# Altium footprint library SamacSys.PcbLib: 1008 footprints (part 42 of 63)
Each footprint in its own frame and in the unit in brackets; x right, y up, seen from the top. Pads: shape width x height; smd on the part's side, far side on the other; paste and mask are expansions set on the pad; w line width, h text height; cw(c..) or ccw(c..) is an arc to the next point about the centre after c.
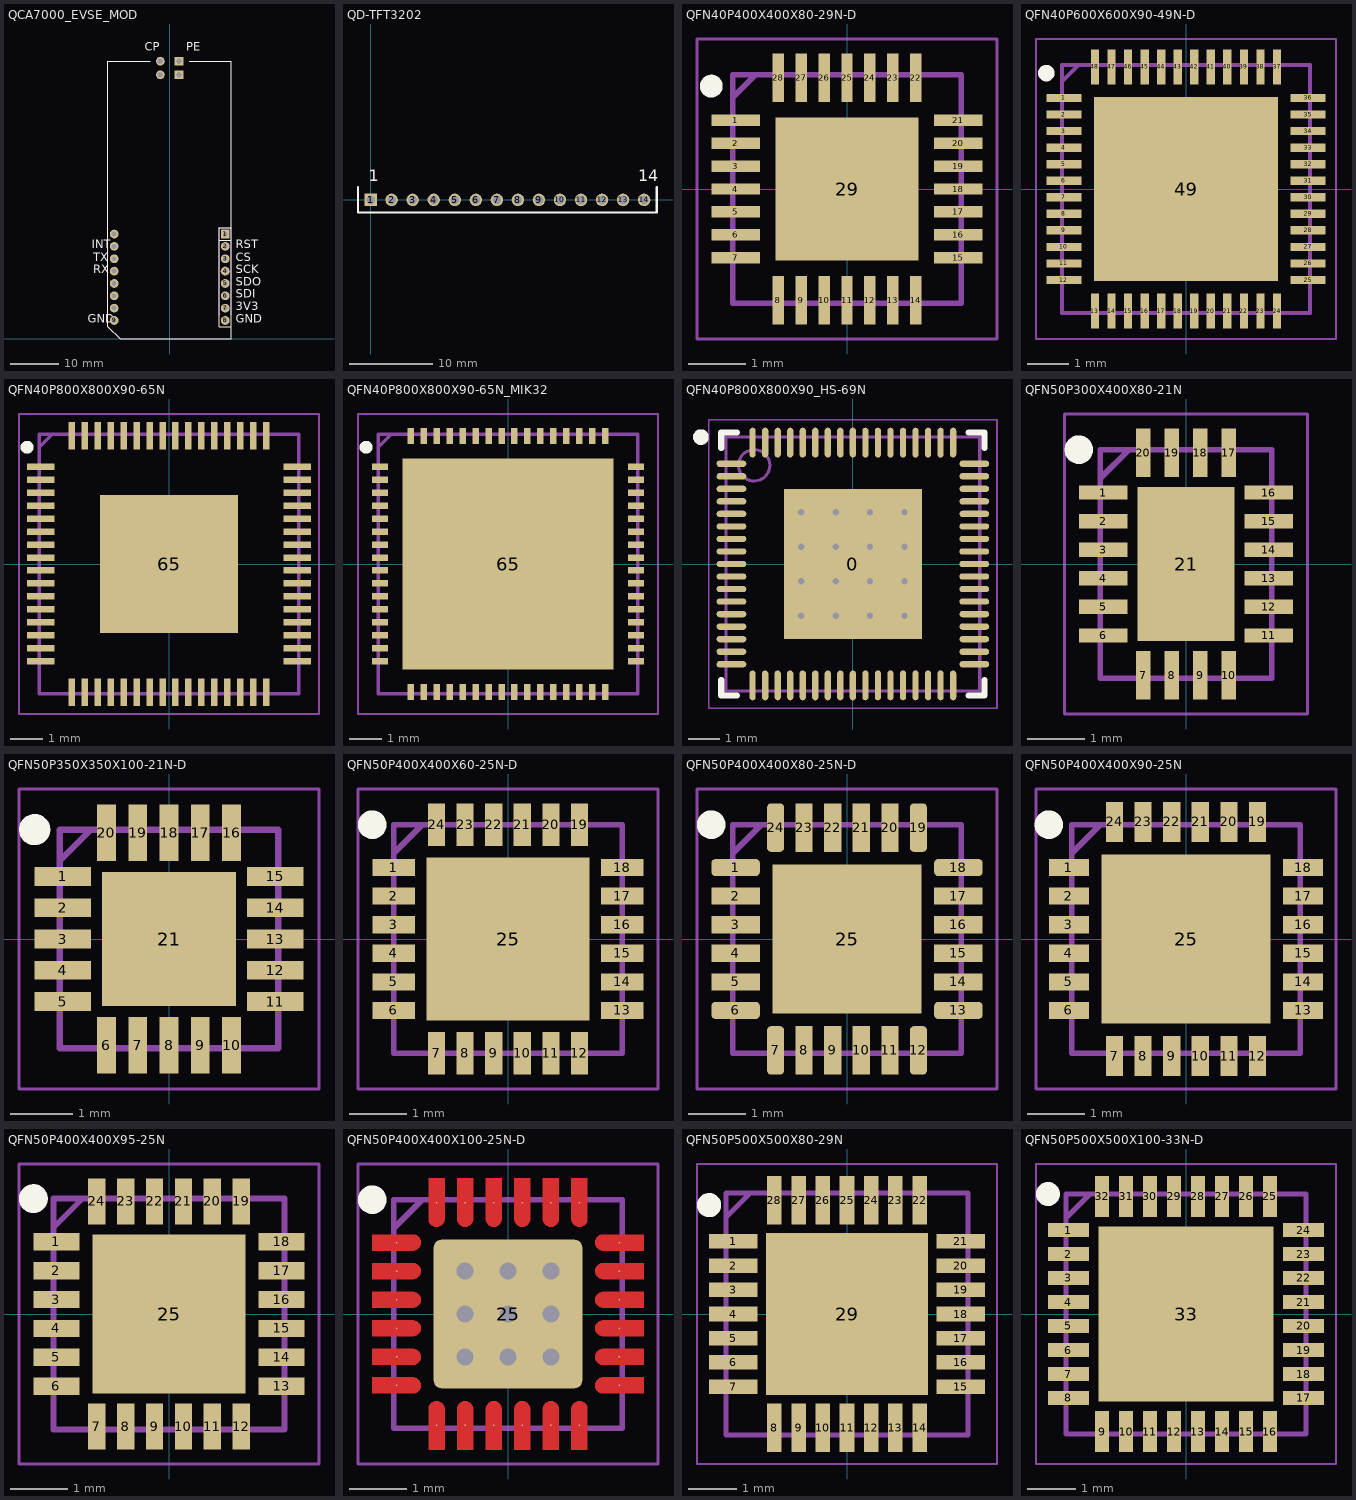
[diagram p41: the footprints below, top view; thin cyan lines are the x and y axes]

## QCA7000_EVSE_MOD [mm] "PBS-7 + 2xPBS-2"
height 10
pads (20):
  rect 1.8x1.8 hole 1: 1(11.43,21.59)
  round 1.8 hole 1: 2(11.43,19.05) 3(11.43,16.51) 4(11.43,13.97) 5(11.43,11.43) 6(11.43,8.89) 7(11.43,6.35) 8(11.43,3.81) 9(-11.43,3.81) 10(-11.43,6.35) 11(-11.43,8.89) 12(-11.43,11.43) 13(-11.43,13.97) 14(-11.43,16.51) 15(-11.43,19.05) 16(-11.43,21.59)
  rect 1.8x1.8 hole 1.1: 17(1.91,54.35) 17(1.91,57.15)
  round 1.8 hole 1.1: 18(-1.91,54.35) 18(-1.91,57.15)
Top Overlay:
  lines w0.2: -4,57.15 -12.7,57.15 -12.7,2.54 -10.16,0 12.7,0 12.7,57.15 4,57.15
  lines w0.25: 10.16,20.331 12.7,20.331 ; 10.16,2.54 10.16,22.871 12.7,22.871 12.7,2.54 10.16,2.54
  text "SDI" at 13.6,7.915 h3
  text "RST" at 13.6,18.075 h3
  text "3V3" at 13.6,5.248 h3
  text "SDO" at 13.6,10.328 h3
  text "SCK" at 13.6,12.868 h3
  text "CS" at 13.6,15.408 h3
  text "INT" at -16.043,18.075 h3
  text "GND" at 13.6,2.708 h3
  text "GND" at -16.884,2.708 h3
  text "TX" at -15.763,15.407 h3
  text "RX" at -15.763,12.867 h3
  text "PE" at 3.44,58.715 h3
  text "CP" at -5.08,58.704 h3
Assembly:
  lines w0.1: 10.16,5.091 10.16,22.871 12.7,22.871 12.7,5.091 ; 10.16,20.331 12.7,20.331
Countryard:
  lines w0.1: 10.16,5.091 10.16,22.871 12.7,22.871 12.7,5.091 ; 10.43,13.981 12.446,13.981 ; 11.43,12.965 11.43,14.997
3D body "User Library-PBS_(DS1023)_1line_connectors_h=5_0_8_5mm_step_2_54mm (4).step": height 8.5, standoff -3, extent 0.675,52.963 3.175,58.543
3D body "User Library-PBS_(DS1023)_1line_connectors_h=5_0_8_5mm_step_2_54mm (4).step": height 8.5, standoff -3, extent -3.135,52.963 -0.635,58.543
3D body "User Library-PBS_(DS1023)_1line_connectors_h=5_0_8_5mm_step_2_54mm (6).step": height 8.5, standoff -3, extent 10.18,2.29 12.68,23.11
3D body "User Library-PBS_(DS1023)_1line_connectors_h=5_0_8_5mm_step_2_54mm (6).step": height 8.5, standoff -3, extent -12.68,2.29 -10.18,23.11

## QD-TFT3202 [mm]
pads (14):
  rect 1.5x1.5 hole 1.05: 1(0,0)
  round 1.5 hole 1.05: 2(2.54,0) 3(5.08,0) 4(7.62,0) 5(10.16,0) 6(12.7,0) 7(15.24,0) 8(17.78,0) 9(20.32,0) 10(22.86,0) 11(25.4,0) 12(27.94,0) 13(30.48,0) 14(33.02,0)
Top Overlay:
  lines w0.254: -1.524,1.524 -1.524,-1.524 34.544,-1.524 34.544,1.524
  text "14" at 32.295,1.759 h2.4
  text "1" at -0.223,1.759 h2.4

## QFN40P400X400X80-29N-D [mm]
pads (29):
  rect 0.85x0.2 smd: 1(-1.95,1.2) 2(-1.95,0.8) 3(-1.95,0.4) 4(-1.95,0) 5(-1.95,-0.4) 6(-1.95,-0.8) 7(-1.95,-1.2) 15(1.95,-1.2) 16(1.95,-0.8) 17(1.95,-0.4) 18(1.95,0) 19(1.95,0.4) 20(1.95,0.8) 21(1.95,1.2)
  rect 0.2x0.85 smd: 8(-1.2,-1.95) 9(-0.8,-1.95) 10(-0.4,-1.95) 11(0,-1.95) 12(0.4,-1.95) 13(0.8,-1.95) 14(1.2,-1.95) 22(1.2,1.95) 23(0.8,1.95) 24(0.4,1.95) 25(0,1.95) 26(-0.4,1.95) 27(-0.8,1.95) 28(-1.2,1.95)
  rect 2.5x2.5 smd: 29(0,0)
Top Overlay:
  circle w0.2: c-2.375,1.8 r0.1
Assembly:
  lines w0.1: -2,1.6 -1.6,2 ; -2,-2 -2,2 2,2 2,-2 -2,-2
Countryard:
  lines w0.05: -2.625,-2.625 -2.625,2.625 2.625,2.625 2.625,-2.625 -2.625,-2.625
3D body "SW3516H.stp": height 0.8, standoff 0, extent -2.05,-2.05 2.05,2.05

## QFN40P600X600X90-49N-D [mm]
pads (49):
  rect 0.85x0.2 smd: 1(-2.95,2.2) 2(-2.95,1.8) 3(-2.95,1.4) 4(-2.95,1) 5(-2.95,0.6) 6(-2.95,0.2) 7(-2.95,-0.2) 8(-2.95,-0.6) 9(-2.95,-1) 10(-2.95,-1.4) 11(-2.95,-1.8) 12(-2.95,-2.2) 25(2.95,-2.2) 26(2.95,-1.8) 27(2.95,-1.4) 28(2.95,-1) 29(2.95,-0.6) 30(2.95,-0.2) 31(2.95,0.2) 32(2.95,0.6) 33(2.95,1) 34(2.95,1.4) 35(2.95,1.8) 36(2.95,2.2)
  rect 0.2x0.85 smd: 13(-2.2,-2.95) 14(-1.8,-2.95) 15(-1.4,-2.95) 16(-1,-2.95) 17(-0.6,-2.95) 18(-0.2,-2.95) 19(0.2,-2.95) 20(0.6,-2.95) 21(1,-2.95) 22(1.4,-2.95) 23(1.8,-2.95) 24(2.2,-2.95) 37(2.2,2.95) 38(1.8,2.95) 39(1.4,2.95) 40(1,2.95) 41(0.6,2.95) 42(0.2,2.95) 43(-0.2,2.95) 44(-0.6,2.95) 45(-1,2.95) 46(-1.4,2.95) 47(-1.8,2.95) 48(-2.2,2.95)
  rect 4.45x4.45 smd: 49(0,0)
Top Overlay:
  circle w0.2: c-3.375,2.8 r0.1
Assembly:
  lines w0.1: -3,2.6 -2.6,3 ; -3,-3 -3,3 3,3 3,-3 -3,-3
Countryard:
  lines w0.05: -3.625,-3.625 -3.625,3.625 3.625,3.625 3.625,-3.625 -3.625,-3.625
3D body "IP175G.stp": height 0.9, standoff 0, extent -3.05,-3.05 3.05,3.05

## QFN40P800X800X90-65N [mm]
pads (65):
  rect 0.85x0.2 smd: 1(-3.95,3) 2(-3.95,2.6) 3(-3.95,2.2) 4(-3.95,1.8) 5(-3.95,1.4) 6(-3.95,1) 7(-3.95,0.6) 8(-3.95,0.2) 9(-3.95,-0.2) 10(-3.95,-0.6) 11(-3.95,-1) 12(-3.95,-1.4) 13(-3.95,-1.8) 14(-3.95,-2.2) 15(-3.95,-2.6) 16(-3.95,-3) 33(3.95,-3) 34(3.95,-2.6) 35(3.95,-2.2) 36(3.95,-1.8) 37(3.95,-1.4) 38(3.95,-1) 39(3.95,-0.6) 40(3.95,-0.2) 41(3.95,0.2) 42(3.95,0.6) 43(3.95,1) 44(3.95,1.4) 45(3.95,1.8) 46(3.95,2.2) 47(3.95,2.6) 48(3.95,3)
  rect 0.2x0.85 smd: 17(-3,-3.95) 18(-2.6,-3.95) 19(-2.2,-3.95) 20(-1.8,-3.95) 21(-1.4,-3.95) 22(-1,-3.95) 23(-0.6,-3.95) 24(-0.2,-3.95) 25(0.2,-3.95) 26(0.6,-3.95) 27(1,-3.95) 28(1.4,-3.95) 29(1.8,-3.95) 30(2.2,-3.95) 31(2.6,-3.95) 32(3,-3.95) 49(3,3.95) 50(2.6,3.95) 51(2.2,3.95) 52(1.8,3.95) 53(1.4,3.95) 54(1,3.95) 55(0.6,3.95) 56(0.2,3.95) 57(-0.2,3.95) 58(-0.6,3.95) 59(-1,3.95) 60(-1.4,3.95) 61(-1.8,3.95) 62(-2.2,3.95) 63(-2.6,3.95) 64(-3,3.95)
  rect 4.25x4.25 smd: 65(0,0)
Top Overlay:
  circle w0.2: c-4.375,3.6 r0.1
Assembly:
  lines w0.1: -4,3.6 -3.6,4 ; -4,-4 -4,4 4,4 4,-4 -4,-4
Countryard:
  lines w0.05: -4.625,-4.625 -4.625,4.625 4.625,4.625 4.625,-4.625 -4.625,-4.625
3D body "KSZ8794CNXIC.stp": height 0.9, standoff 0, extent -4.05,-4.05 4.05,4.05

## QFN40P800X800X90-65N_MIK32 [mm]
pads (65):
  rect 0.5x0.2 smd mask+0.051: 1(-3.95,3) 2(-3.95,2.6) 3(-3.95,2.2) 4(-3.95,1.8) 5(-3.95,1.4) 6(-3.95,1) 7(-3.95,0.6) 8(-3.95,0.2) 9(-3.95,-0.2) 10(-3.95,-0.6) 11(-3.95,-1) 12(-3.95,-1.4) 13(-3.95,-1.8) 14(-3.95,-2.2) 15(-3.95,-2.6) 16(-3.95,-3) 33(3.95,-3) 34(3.95,-2.6) 35(3.95,-2.2) 36(3.95,-1.8) 37(3.95,-1.4) 38(3.95,-1) 39(3.95,-0.6) 40(3.95,-0.2) 41(3.95,0.2) 42(3.95,0.6) 43(3.95,1) 44(3.95,1.4) 45(3.95,1.8) 46(3.95,2.2) 47(3.95,2.6) 48(3.95,3)
  rect 0.2x0.5 smd mask+0.051: 17(-3,-3.95) 18(-2.6,-3.95) 19(-2.2,-3.95) 20(-1.8,-3.95) 21(-1.4,-3.95) 22(-1,-3.95) 23(-0.6,-3.95) 24(-0.2,-3.95) 25(0.2,-3.95) 26(0.6,-3.95) 27(1,-3.95) 28(1.4,-3.95) 29(1.8,-3.95) 30(2.2,-3.95) 31(2.6,-3.95) 32(3,-3.95) 49(3,3.95) 50(2.6,3.95) 51(2.2,3.95) 52(1.8,3.95) 53(1.4,3.95) 54(1,3.95) 55(0.6,3.95) 56(0.2,3.95) 57(-0.2,3.95) 58(-0.6,3.95) 59(-1,3.95) 60(-1.4,3.95) 61(-1.8,3.95) 62(-2.2,3.95) 63(-2.6,3.95) 64(-3,3.95)
  rect 6.5x6.5 smd: 65(0,0)
Top Overlay:
  circle w0.2: c-4.375,3.6 r0.1
Assembly:
  lines w0.1: -4,3.6 -3.6,4 ; -4,-4 -4,4 4,4 4,-4 -4,-4
Countryard:
  lines w0.05: -4.625,-4.625 -4.625,4.625 4.625,4.625 4.625,-4.625 -4.625,-4.625
3D body "KSZ8794CNXIC.stp": height 0.9, standoff 0, extent -4.05,-4.05 4.05,4.05

## QFN40P800X800X90_HS-69N [mm] "QFN, 68-Leads, Body 8,00x8,00mm, Pitch 0,40mm, Thermal Pad 6,20x6,20mm, IPC Medium Density"
height 0.9
pads (69):
  rect 4.4x4.8 smd: 0(0,0)
  oval 0.95x0.2 smd: 1(-3.875,3.2) 2(-3.875,2.8) 3(-3.875,2.4) 4(-3.875,2) 5(-3.875,1.6) 6(-3.875,1.2) 7(-3.875,0.8) 8(-3.875,0.4) 9(-3.875,0) 10(-3.875,-0.4) 11(-3.875,-0.8) 12(-3.875,-1.2) 13(-3.875,-1.6) 14(-3.875,-2) 15(-3.875,-2.4) 16(-3.875,-2.8) 17(-3.875,-3.2) 35(3.875,-3.2) 36(3.875,-2.8) 37(3.875,-2.4) 38(3.875,-2) 39(3.875,-1.6) 40(3.875,-1.2) 41(3.875,-0.8) 42(3.875,-0.4) 43(3.875,0) 44(3.875,0.4) 45(3.875,0.8) 46(3.875,1.2) 47(3.875,1.6) 48(3.875,2) 49(3.875,2.4) 50(3.875,2.8) 51(3.875,3.2)
  oval 0.2x0.95 smd: 18(-3.2,-3.875) 19(-2.8,-3.875) 20(-2.4,-3.875) 21(-2,-3.875) 22(-1.6,-3.875) 23(-1.2,-3.875) 24(-0.8,-3.875) 25(-0.4,-3.875) 26(0,-3.875) 27(0.4,-3.875) 28(0.8,-3.875) 29(1.2,-3.875) 30(1.6,-3.875) 31(2,-3.875) 32(2.4,-3.875) 33(2.8,-3.875) 34(3.2,-3.875) 52(3.2,3.875) 53(2.8,3.875) 54(2.4,3.875) 55(2,3.875) 56(1.6,3.875) 57(1.2,3.875) 58(0.8,3.875) 59(0.4,3.875) 60(0,3.875) 61(-0.4,3.875) 62(-0.8,3.875) 63(-1.2,3.875) 64(-1.6,3.875) 65(-2,3.875) 66(-2.4,3.875) 67(-2.8,3.875) 68(-3.2,3.875)
via 1.65,-1.65 diameter 0.5 hole 0.2
via 0.55,-1.65 diameter 0.5 hole 0.2
via -0.55,-1.65 diameter 0.5 hole 0.2
via -1.65,-1.65 diameter 0.5 hole 0.2
via 1.65,-0.55 diameter 0.5 hole 0.2
via 0.55,-0.55 diameter 0.5 hole 0.2
via -0.55,-0.55 diameter 0.5 hole 0.2
via -1.65,-0.55 diameter 0.5 hole 0.2
via 1.65,0.55 diameter 0.5 hole 0.2
via 0.55,0.55 diameter 0.5 hole 0.2
via -0.55,0.55 diameter 0.5 hole 0.2
via -1.65,0.55 diameter 0.5 hole 0.2
via 1.65,1.65 diameter 0.5 hole 0.2
via 0.55,1.65 diameter 0.5 hole 0.2
via -0.55,1.65 diameter 0.5 hole 0.2
via -1.65,1.65 diameter 0.5 hole 0.2
Top Overlay:
  circle w0.25: c-4.85,4.05 r0.125
  lines w0.2: -4.2,-3.7 -4.2,-4.2 -3.7,-4.2 ; -4.2,3.7 -4.2,4.2 -3.7,4.2 ; 3.7,-4.2 4.2,-4.2 4.2,-3.7 ; 3.7,4.2 4.2,4.2 4.2,3.7
Top Assembly:
  circle w0.1: c-3.15,3.15 r0.5
  lines w0.1: -4.05,-4.05 4.05,-4.05 4.05,4.05 -4.05,4.05 -4.05,-4.05
Top Courtyard:
  lines w0.05: -4.6,-4.6 4.6,-4.6 4.6,4.6 -4.6,4.6 -4.6,-4.6
  lines w0.1: -0.5,0 0.5,0 ; 0,-0.5 0,0.5
3D body "QFN40P800X800X90_HS-69N.step": height 0.9, standoff 0, extent -4.1,-4.1 4.1,4.1

## QFN50P300X400X80-21N [mm]
pads (21):
  rect 0.85x0.25 smd: 1(-1.45,1.25) 2(-1.45,0.75) 3(-1.45,0.25) 4(-1.45,-0.25) 5(-1.45,-0.75) 6(-1.45,-1.25) 11(1.45,-1.25) 12(1.45,-0.75) 13(1.45,-0.25) 14(1.45,0.25) 15(1.45,0.75) 16(1.45,1.25)
  rect 0.25x0.85 smd: 7(-0.75,-1.95) 8(-0.25,-1.95) 9(0.25,-1.95) 10(0.75,-1.95) 17(0.75,1.95) 18(0.25,1.95) 19(-0.25,1.95) 20(-0.75,1.95)
  rect 1.7x2.7 smd: 21(0,0)
Top Overlay:
  circle w0.25: c-1.875,2 r0.125
Top Assembly:
  lines w0.1: -1.5,1.5 -1,2 ; -1.5,-2 1.5,-2 1.5,2 -1.5,2 -1.5,-2
Top Courtyard:
  lines w0.05: -2.125,-2.625 2.125,-2.625 2.125,2.625 -2.125,2.625 -2.125,-2.625

## QFN50P350X350X100-21N-D [mm]
pads (21):
  rect 0.9x0.3 smd: 1(-1.7,1) 2(-1.7,0.5) 3(-1.7,0) 4(-1.7,-0.5) 5(-1.7,-1) 11(1.7,-1) 12(1.7,-0.5) 13(1.7,0) 14(1.7,0.5) 15(1.7,1)
  rect 0.3x0.9 smd: 6(-1,-1.7) 7(-0.5,-1.7) 8(0,-1.7) 9(0.5,-1.7) 10(1,-1.7) 16(1,1.7) 17(0.5,1.7) 18(0,1.7) 19(-0.5,1.7) 20(-1,1.7)
  rect 2.15x2.15 smd: 21(0,0)
Top Overlay:
  circle w0.25: c-2.15,1.75 r0.125
Assembly:
  lines w0.1: -1.75,1.25 -1.25,1.75 ; -1.75,-1.75 -1.75,1.75 1.75,1.75 1.75,-1.75 -1.75,-1.75
Countryard:
  lines w0.05: -2.4,-2.4 -2.4,2.4 2.4,2.4 2.4,-2.4 -2.4,-2.4
3D body "TPS7A8300RGRR.stp": height 1, standoff 0, extent -1.8,-1.8 1.8,1.8

## QFN50P400X400X60-25N-D [mm]
pads (25):
  rect 0.75x0.3 smd: 1(-2,1.25) 2(-2,0.75) 3(-2,0.25) 4(-2,-0.25) 5(-2,-0.75) 6(-2,-1.25) 13(2,-1.25) 14(2,-0.75) 15(2,-0.25) 16(2,0.25) 17(2,0.75) 18(2,1.25)
  rect 0.3x0.75 smd: 7(-1.25,-2) 8(-0.75,-2) 9(-0.25,-2) 10(0.25,-2) 11(0.75,-2) 12(1.25,-2) 19(1.25,2) 20(0.75,2) 21(0.25,2) 22(-0.25,2) 23(-0.75,2) 24(-1.25,2)
  rect 2.85x2.85 smd: 25(0,0)
Top Overlay:
  circle w0.25: c-2.375,2 r0.125
Assembly:
  lines w0.1: -2,1.5 -1.5,2 ; -2,-2 -2,2 2,2 2,-2 -2,-2
Countryard:
  lines w0.05: -2.625,-2.625 -2.625,2.625 2.625,2.625 2.625,-2.625 -2.625,-2.625
3D body "CYPD3175-24LQXQ.stp": height 0.6, standoff 0, extent -2.05,-2.05 2.05,2.05

## QFN50P400X400X80-25N-D [mm]
pads (25):
  rrect50% 0.85x0.3 smd: 1(-1.95,1.25) 6(-1.95,-1.25) 13(1.95,-1.25) 18(1.95,1.25)
  rect 0.85x0.3 smd: 2(-1.95,0.75) 3(-1.95,0.25) 4(-1.95,-0.25) 5(-1.95,-0.75) 14(1.95,-0.75) 15(1.95,-0.25) 16(1.95,0.25) 17(1.95,0.75)
  rrect50% 0.3x0.85 smd: 7(-1.25,-1.95) 12(1.25,-1.95) 19(1.25,1.95) 24(-1.25,1.95)
  rect 0.3x0.85 smd: 8(-0.75,-1.95) 9(-0.25,-1.95) 10(0.25,-1.95) 11(0.75,-1.95) 20(0.75,1.95) 21(0.25,1.95) 22(-0.25,1.95) 23(-0.75,1.95)
  rect 2.6x2.6 smd: 25(0,0)
Top Overlay:
  circle w0.25: c-2.375,2 r0.125
Assembly:
  lines w0.1: -2,1.5 -1.5,2 ; -2,-2 2,-2 2,2 -2,2 -2,-2
Countryard:
  lines w0.05: -2.625,-2.625 2.625,-2.625 2.625,2.625 -2.625,2.625 -2.625,-2.625
3D body "ip6518.stp": height 0.8, standoff 0, extent -2.05,-2.05 2.05,2.05

## QFN50P400X400X90-25N [mm]
pads (25):
  rect 0.7x0.3 smd: 1(-2.05,1.25) 2(-2.05,0.75) 3(-2.05,0.25) 4(-2.05,-0.25) 5(-2.05,-0.75) 6(-2.05,-1.25) 13(2.05,-1.25) 14(2.05,-0.75) 15(2.05,-0.25) 16(2.05,0.25) 17(2.05,0.75) 18(2.05,1.25)
  rect 0.3x0.7 smd: 7(-1.25,-2.05) 8(-0.75,-2.05) 9(-0.25,-2.05) 10(0.25,-2.05) 11(0.75,-2.05) 12(1.25,-2.05) 19(1.25,2.05) 20(0.75,2.05) 21(0.25,2.05) 22(-0.25,2.05) 23(-0.75,2.05) 24(-1.25,2.05)
  rect 2.95x2.95 smd: 25(0,0)
Top Overlay:
  circle w0.25: c-2.4,2 r0.125
Assembly:
  lines w0.1: -2,1.5 -1.5,2 ; -2,-2 -2,2 2,2 2,-2 -2,-2
Countryard:
  lines w0.05: -2.625,-2.625 -2.625,2.625 2.625,2.625 2.625,-2.625 -2.625,-2.625
3D body "RTL8152B-VB-CG.stp": height 0.9, standoff 0, extent -2.05,-2.05 2.05,2.05

## QFN50P400X400X95-25N [mm]
pads (25):
  rect 0.8x0.3 smd: 1(-1.95,1.25) 2(-1.95,0.75) 3(-1.95,0.25) 4(-1.95,-0.25) 5(-1.95,-0.75) 6(-1.95,-1.25) 13(1.95,-1.25) 14(1.95,-0.75) 15(1.95,-0.25) 16(1.95,0.25) 17(1.95,0.75) 18(1.95,1.25)
  rect 0.3x0.8 smd: 7(-1.25,-1.95) 8(-0.75,-1.95) 9(-0.25,-1.95) 10(0.25,-1.95) 11(0.75,-1.95) 12(1.25,-1.95) 19(1.25,1.95) 20(0.75,1.95) 21(0.25,1.95) 22(-0.25,1.95) 23(-0.75,1.95) 24(-1.25,1.95)
  rect 2.65x2.75 smd: 25(0,0)
Top Overlay:
  circle w0.25: c-2.35,2 r0.125
Assembly:
  lines w0.1: -2,1.5 -1.5,2 ; -2,-2 2,-2 2,2 -2,2 -2,-2
Countryard:
  lines w0.05: -2.6,-2.6 2.6,-2.6 2.6,2.6 -2.6,2.6 -2.6,-2.6
3D body "MPU-6000.stp": height 0.88, standoff -0.02, extent -2,-2 2,2

## QFN50P400X400X100-25N-D [mm]
pads (25):
  round 0.025 smd mask+0.05: 1(-1.95,1.25) 2(-1.95,0.75) 3(-1.95,0.25) 4(-1.95,-0.25) 5(-1.95,-0.75) 6(-1.95,-1.25) 7(-1.25,-1.95) 8(-0.75,-1.95) 9(-0.25,-1.95) 10(0.25,-1.95) 11(0.75,-1.95) 12(1.25,-1.95) 13(1.95,-1.25) 14(1.95,-0.75) 15(1.95,-0.25) 16(1.95,0.25) 17(1.95,0.75) 18(1.95,1.25) 19(1.25,1.95) 20(0.75,1.95) 21(0.25,1.95) 22(-0.25,1.95) 23(-0.75,1.95) 24(-1.25,1.95)
  rrect10% 2.6x2.6 smd paste-5 mask+0.05: 25(0,0)
via 0,0 diameter 0.5 hole 0.3
via -0.75,0 diameter 0.5 hole 0.3
via -0.75,0.75 diameter 0.5 hole 0.3
via 0,0.75 diameter 0.5 hole 0.3
via 0.75,0.75 diameter 0.5 hole 0.3
via 0.75,0 diameter 0.5 hole 0.3
via 0.75,-0.75 diameter 0.5 hole 0.3
via 0,-0.75 diameter 0.5 hole 0.3
via -0.75,-0.75 diameter 0.5 hole 0.3
Top Layer:
  region: -1.11,1.665 -1.11,1.651 -1.115,1.624 -1.126,1.599 -1.141,1.576 -1.161,1.556 -1.184,1.541 -1.209,1.53 -1.236,1.525 -1.25,1.525 -1.264,1.525 -1.291,1.53 -1.316,1.541 -1.339,1.556 -1.359,1.576 -1.374,1.599 -1.385,1.624 -1.39,1.651 -1.39,1.665 -1.39,2.375 -1.11,2.375
  region: -0.61,1.665 -0.61,1.651 -0.615,1.624 -0.626,1.599 -0.641,1.576 -0.661,1.556 -0.684,1.541 -0.709,1.53 -0.736,1.525 -0.75,1.525 -0.764,1.525 -0.791,1.53 -0.816,1.541 -0.839,1.556 -0.859,1.576 -0.874,1.599 -0.885,1.624 -0.89,1.651 -0.89,1.665 -0.89,2.375 -0.61,2.375
  region: -0.11,1.665 -0.11,1.651 -0.115,1.624 -0.126,1.599 -0.141,1.576 -0.161,1.556 -0.184,1.541 -0.209,1.53 -0.236,1.525 -0.25,1.525 -0.264,1.525 -0.291,1.53 -0.316,1.541 -0.339,1.556 -0.359,1.576 -0.374,1.599 -0.385,1.624 -0.39,1.651 -0.39,1.665 -0.39,2.375 -0.11,2.375
  region: 0.39,1.665 0.39,1.651 0.385,1.624 0.374,1.599 0.359,1.576 0.339,1.556 0.316,1.541 0.291,1.53 0.264,1.525 0.25,1.525 0.236,1.525 0.209,1.53 0.184,1.541 0.161,1.556 0.141,1.576 0.126,1.599 0.115,1.624 0.11,1.651 0.11,1.665 0.11,2.375 0.39,2.375
  region: 0.89,1.665 0.89,1.651 0.885,1.624 0.874,1.599 0.859,1.576 0.839,1.556 0.816,1.541 0.791,1.53 0.764,1.525 0.75,1.525 0.736,1.525 0.709,1.53 0.684,1.541 0.661,1.556 0.641,1.576 0.626,1.599 0.615,1.624 0.61,1.651 0.61,1.665 0.61,2.375 0.89,2.375
  region: 1.39,1.665 1.39,1.651 1.385,1.624 1.374,1.599 1.359,1.576 1.339,1.556 1.316,1.541 1.291,1.53 1.264,1.525 1.25,1.525 1.236,1.525 1.209,1.53 1.184,1.541 1.161,1.556 1.141,1.576 1.126,1.599 1.115,1.624 1.11,1.651 1.11,1.665 1.11,2.375 1.39,2.375
  region: 1.665,1.11 1.651,1.11 1.624,1.115 1.599,1.126 1.576,1.141 1.556,1.161 1.541,1.184 1.53,1.209 1.525,1.236 1.525,1.25 1.525,1.264 1.53,1.291 1.541,1.316 1.556,1.339 1.576,1.359 1.599,1.374 1.624,1.385 1.651,1.39 1.665,1.39 2.375,1.39 2.375,1.11
  region: 1.665,0.61 1.651,0.61 1.624,0.615 1.599,0.626 1.576,0.641 1.556,0.661 1.541,0.684 1.53,0.709 1.525,0.736 1.525,0.75 1.525,0.764 1.53,0.791 1.541,0.816 1.556,0.839 1.576,0.859 1.599,0.874 1.624,0.885 1.651,0.89 1.665,0.89 2.375,0.89 2.375,0.61
  region: 1.665,0.11 1.651,0.11 1.624,0.115 1.599,0.126 1.576,0.141 1.556,0.161 1.541,0.184 1.53,0.209 1.525,0.236 1.525,0.25 1.525,0.264 1.53,0.291 1.541,0.316 1.556,0.339 1.576,0.359 1.599,0.374 1.624,0.385 1.651,0.39 1.665,0.39 2.375,0.39 2.375,0.11
  region: 1.665,-0.39 1.651,-0.39 1.624,-0.385 1.599,-0.374 1.576,-0.359 1.556,-0.339 1.541,-0.316 1.53,-0.291 1.525,-0.264 1.525,-0.25 1.525,-0.236 1.53,-0.209 1.541,-0.184 1.556,-0.161 1.576,-0.141 1.599,-0.126 1.624,-0.115 1.651,-0.11 1.665,-0.11 2.375,-0.11 2.375,-0.39
  region: 1.665,-0.89 1.651,-0.89 1.624,-0.885 1.599,-0.874 1.576,-0.859 1.556,-0.839 1.541,-0.816 1.53,-0.791 1.525,-0.764 1.525,-0.75 1.525,-0.736 1.53,-0.709 1.541,-0.684 1.556,-0.661 1.576,-0.641 1.599,-0.626 1.624,-0.615 1.651,-0.61 1.665,-0.61 2.375,-0.61 2.375,-0.89
  region: 1.665,-1.39 1.651,-1.39 1.624,-1.385 1.599,-1.374 1.576,-1.359 1.556,-1.339 1.541,-1.316 1.53,-1.291 1.525,-1.264 1.525,-1.25 1.525,-1.236 1.53,-1.209 1.541,-1.184 1.556,-1.161 1.576,-1.141 1.599,-1.126 1.624,-1.115 1.651,-1.11 1.665,-1.11 2.375,-1.11 2.375,-1.39
  region: 1.11,-1.665 1.11,-1.651 1.115,-1.624 1.126,-1.599 1.141,-1.576 1.161,-1.556 1.184,-1.541 1.209,-1.53 1.236,-1.525 1.25,-1.525 1.264,-1.525 1.291,-1.53 1.316,-1.541 1.339,-1.556 1.359,-1.576 1.374,-1.599 1.385,-1.624 1.39,-1.651 1.39,-1.665 1.39,-2.375 1.11,-2.375
  region: 0.61,-1.665 0.61,-1.651 0.615,-1.624 0.626,-1.599 0.641,-1.576 0.661,-1.556 0.684,-1.541 0.709,-1.53 0.736,-1.525 0.75,-1.525 0.764,-1.525 0.791,-1.53 0.816,-1.541 0.839,-1.556 0.859,-1.576 0.874,-1.599 0.885,-1.624 0.89,-1.651 0.89,-1.665 0.89,-2.375 0.61,-2.375
  region: 0.11,-1.665 0.11,-1.651 0.115,-1.624 0.126,-1.599 0.141,-1.576 0.161,-1.556 0.184,-1.541 0.209,-1.53 0.236,-1.525 0.25,-1.525 0.264,-1.525 0.291,-1.53 0.316,-1.541 0.339,-1.556 0.359,-1.576 0.374,-1.599 0.385,-1.624 0.39,-1.651 0.39,-1.665 0.39,-2.375 0.11,-2.375
  region: -0.39,-1.665 -0.39,-1.651 -0.385,-1.624 -0.374,-1.599 -0.359,-1.576 -0.339,-1.556 -0.316,-1.541 -0.291,-1.53 -0.264,-1.525 -0.25,-1.525 -0.236,-1.525 -0.209,-1.53 -0.184,-1.541 -0.161,-1.556 -0.141,-1.576 -0.126,-1.599 -0.115,-1.624 -0.11,-1.651 -0.11,-1.665 -0.11,-2.375 -0.39,-2.375
  region: -0.89,-1.665 -0.89,-1.651 -0.885,-1.624 -0.874,-1.599 -0.859,-1.576 -0.839,-1.556 -0.816,-1.541 -0.791,-1.53 -0.764,-1.525 -0.75,-1.525 -0.736,-1.525 -0.709,-1.53 -0.684,-1.541 -0.661,-1.556 -0.641,-1.576 -0.626,-1.599 -0.615,-1.624 -0.61,-1.651 -0.61,-1.665 -0.61,-2.375 -0.89,-2.375
  region: -1.39,-1.665 -1.39,-1.651 -1.385,-1.624 -1.374,-1.599 -1.359,-1.576 -1.339,-1.556 -1.316,-1.541 -1.291,-1.53 -1.264,-1.525 -1.25,-1.525 -1.236,-1.525 -1.209,-1.53 -1.184,-1.541 -1.161,-1.556 -1.141,-1.576 -1.126,-1.599 -1.115,-1.624 -1.11,-1.651 -1.11,-1.665 -1.11,-2.375 -1.39,-2.375
  region: -1.665,-1.11 -1.651,-1.11 -1.624,-1.115 -1.599,-1.126 -1.576,-1.141 -1.556,-1.161 -1.541,-1.184 -1.53,-1.209 -1.525,-1.236 -1.525,-1.25 -1.525,-1.264 -1.53,-1.291 -1.541,-1.316 -1.556,-1.339 -1.576,-1.359 -1.599,-1.374 -1.624,-1.385 -1.651,-1.39 -1.665,-1.39 -2.375,-1.39 -2.375,-1.11
  region: -1.665,-0.61 -1.651,-0.61 -1.624,-0.615 -1.599,-0.626 -1.576,-0.641 -1.556,-0.661 -1.541,-0.684 -1.53,-0.709 -1.525,-0.736 -1.525,-0.75 -1.525,-0.764 -1.53,-0.791 -1.541,-0.816 -1.556,-0.839 -1.576,-0.859 -1.599,-0.874 -1.624,-0.885 -1.651,-0.89 -1.665,-0.89 -2.375,-0.89 -2.375,-0.61
  region: -1.665,-0.11 -1.651,-0.11 -1.624,-0.115 -1.599,-0.126 -1.576,-0.141 -1.556,-0.161 -1.541,-0.184 -1.53,-0.209 -1.525,-0.236 -1.525,-0.25 -1.525,-0.264 -1.53,-0.291 -1.541,-0.316 -1.556,-0.339 -1.576,-0.359 -1.599,-0.374 -1.624,-0.385 -1.651,-0.39 -1.665,-0.39 -2.375,-0.39 -2.375,-0.11
  region: -1.665,0.39 -1.651,0.39 -1.624,0.385 -1.599,0.374 -1.576,0.359 -1.556,0.339 -1.541,0.316 -1.53,0.291 -1.525,0.264 -1.525,0.25 -1.525,0.236 -1.53,0.209 -1.541,0.184 -1.556,0.161 -1.576,0.141 -1.599,0.126 -1.624,0.115 -1.651,0.11 -1.665,0.11 -2.375,0.11 -2.375,0.39
  region: -1.665,0.89 -1.651,0.89 -1.624,0.885 -1.599,0.874 -1.576,0.859 -1.556,0.839 -1.541,0.816 -1.53,0.791 -1.525,0.764 -1.525,0.75 -1.525,0.736 -1.53,0.709 -1.541,0.684 -1.556,0.661 -1.576,0.641 -1.599,0.626 -1.624,0.615 -1.651,0.61 -1.665,0.61 -2.375,0.61 -2.375,0.89
  region: -1.665,1.39 -1.651,1.39 -1.624,1.385 -1.599,1.374 -1.576,1.359 -1.556,1.339 -1.541,1.316 -1.53,1.291 -1.525,1.264 -1.525,1.25 -1.525,1.236 -1.53,1.209 -1.541,1.184 -1.556,1.161 -1.576,1.141 -1.599,1.126 -1.624,1.115 -1.651,1.11 -1.665,1.11 -2.375,1.11 -2.375,1.39
Top Overlay:
  circle w0.25: c-2.375,2 r0.125
Top Paste:
  rectangle: -0.975,0.15 -0.15,0.975
  region: -0.15,-0.975 -0.15,-0.15 -0.975,-0.15 -0.975,-0.975
  region: 0.975,-0.15 0.15,-0.15 0.15,-0.975 0.975,-0.975
  region: 0.15,0.975 0.15,0.15 0.975,0.15 0.975,0.975
Assembly:
  lines w0.1: -2,1.5 -1.5,2 ; -2,-2 -2,2 2,2 2,-2 -2,-2
Countryard:
  lines w0.05: -2.625,-2.625 -2.625,2.625 2.625,2.625 2.625,-2.625 -2.625,-2.625
3D body "LAN8720AI-CP-ABC.stp": height 1, standoff 0, extent -2.05,-2.05 2.05,2.05

## QFN50P500X500X80-29N [mm]
pads (29):
  rect 1x0.3 smd: 1(-2.35,1.5) 2(-2.35,1) 3(-2.35,0.5) 4(-2.35,0) 5(-2.35,-0.5) 6(-2.35,-1) 7(-2.35,-1.5) 15(2.35,-1.5) 16(2.35,-1) 17(2.35,-0.5) 18(2.35,0) 19(2.35,0.5) 20(2.35,1) 21(2.35,1.5)
  rect 0.3x1 smd: 8(-1.5,-2.35) 9(-1,-2.35) 10(-0.5,-2.35) 11(0,-2.35) 12(0.5,-2.35) 13(1,-2.35) 14(1.5,-2.35) 22(1.5,2.35) 23(1,2.35) 24(0.5,2.35) 25(0,2.35) 26(-0.5,2.35) 27(-1,2.35) 28(-1.5,2.35)
  rect 3.35x3.35 smd: 29(0,0)
Top Overlay:
  circle w0.25: c-2.85,2.25 r0.125
Assembly:
  lines w0.1: -2.5,2 -2,2.5 ; -2.5,-2.5 2.5,-2.5 2.5,2.5 -2.5,2.5 -2.5,-2.5
Countryard:
  lines w0.05: -3.1,-3.1 3.1,-3.1 3.1,3.1 -3.1,3.1 -3.1,-3.1
3D body "MAX2771ETI+T.stp": height 0.8, standoff 0, extent -2.55,-2.55 2.55,2.55

## QFN50P500X500X100-33N-D [mm]
pads (33):
  rect 0.85x0.3 smd: 1(-2.45,1.75) 2(-2.45,1.25) 3(-2.45,0.75) 4(-2.45,0.25) 5(-2.45,-0.25) 6(-2.45,-0.75) 7(-2.45,-1.25) 8(-2.45,-1.75) 17(2.45,-1.75) 18(2.45,-1.25) 19(2.45,-0.75) 20(2.45,-0.25) 21(2.45,0.25) 22(2.45,0.75) 23(2.45,1.25) 24(2.45,1.75)
  rect 0.3x0.85 smd: 9(-1.75,-2.45) 10(-1.25,-2.45) 11(-0.75,-2.45) 12(-0.25,-2.45) 13(0.25,-2.45) 14(0.75,-2.45) 15(1.25,-2.45) 16(1.75,-2.45) 25(1.75,2.45) 26(1.25,2.45) 27(0.75,2.45) 28(0.25,2.45) 29(-0.25,2.45) 30(-0.75,2.45) 31(-1.25,2.45) 32(-1.75,2.45)
  rect 3.65x3.65 smd: 33(0,0)
Top Overlay:
  circle w0.25: c-2.875,2.5 r0.125
Assembly:
  lines w0.1: -2.5,2 -2,2.5 ; -2.5,-2.5 -2.5,2.5 2.5,2.5 2.5,-2.5 -2.5,-2.5
Countryard:
  lines w0.05: -3.125,-3.125 -3.125,3.125 3.125,3.125 3.125,-3.125 -3.125,-3.125
3D body "ADAU1761BCPZ.stp": height 1, standoff 0, extent -2.55,-2.55 2.55,2.55